# EAGLE library part IC_MAX4378 (library dp_devices.v6)
Quad High side current sense amplifer with internal gain
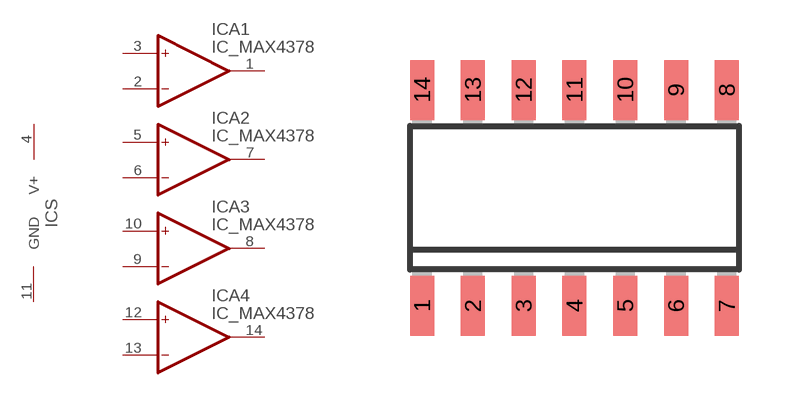
[diagram p167: symbol with the pads of SOIC-14; footprint SOIC-14]

Designator prefix IC; gates A1=OPAMP S=SUPPLY A2=OPAMP A3=OPAMP A4=OPAMP

## IC_MAX4378  [SOIC-14]
1  A1:OUT  out
2  A1:-  in
3  A1:+  in
4  S:V+  sup
5  A2:+  in
6  A2:-  in
7  A2:OUT  out
8  A3:OUT  out
9  A3:-  in
10  A3:+  in
11  S:GND  sup
12  A4:+  in
13  A4:-  in
14  A4:OUT  out

## Footprint SOIC-14 (pad centres in mm)
SSOP-14, 0.6 x 1.5 mm pad, 1.27mm pad pitch
smd 0.6 x 1.5: 1 -3.81,-2.7; 2 -2.54,-2.7; 3 -1.27,-2.7; 4 0,-2.7; 5 1.27,-2.7; 6 2.54,-2.7; 7 3.81,-2.7; 8 3.81,2.7; 9 2.54,2.7; 10 1.27,2.7; 11 0,2.7; 12 -1.27,2.7; 13 -2.54,2.7; 14 -3.81,2.7